# Altium footprint library PcbLib.PcbLib: 162 footprints (part 5 of 11)
Each footprint in its own frame and in the unit in brackets; x right, y up, seen from the top. Pads: shape width x height; smd on the part's side, far side on the other; paste and mask are expansions set on the pad; w line width, h text height; cw(c..) or ccw(c..) is an arc to the next point about the centre after c.
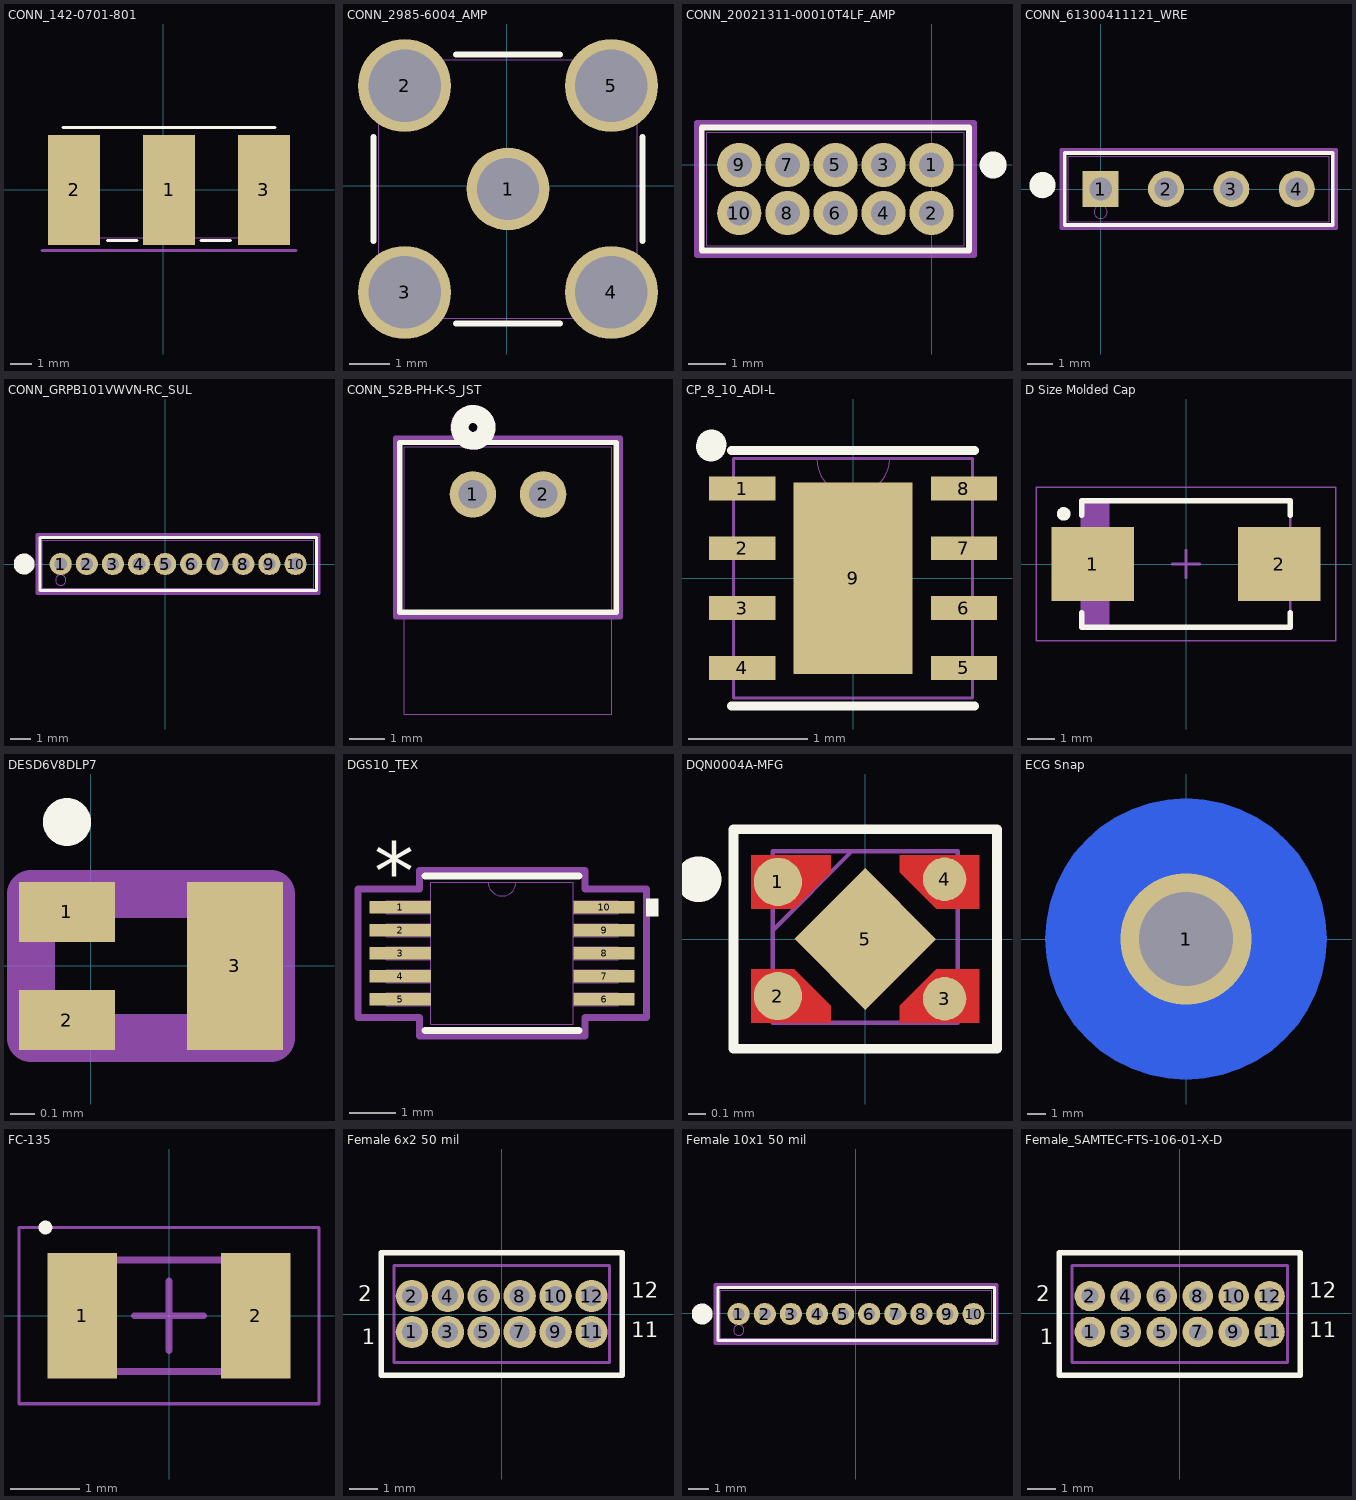
[diagram p4: the footprints below, top view; thin cyan lines are the x and y axes]

## CONN_142-0701-801 [mil]
pads (3):
  rect 95x200 smd: 1(10,0) 2(-162.5,0) 3(182.5,0)
Top Overlay:
  lines w6: -182.5,113.1 202.5,113.1 ; -101.9,-92 -48.1,-92 ; 68.1,-92 121.9,-92
Mechanical 5:
  lines w6: -220,-110 240,-110
Mechanical 13:
  circle w20: c10,-75 r15
  lines w1: -177.5,-87 197.5,-87
3D body "32k145-400l5.stp": height 165.35, standoff -145.67, extent -177,-465.09 197.01,95.94

## CONN_2985-6004_AMP [mil]
pads (5):
  round 80 hole 60 mask+0: 1(1,-3)
  round 90 hole 70 mask+0: 2(-99,97) 3(-99,-103) 4(101,-103) 5(101,97)
Top Overlay:
  lines w6: -129,-53.24 -129,47.24 ; -49.24,-133 51.24,-133 ; -49.24,127 51.24,127 ; 131,-53.24 131,47.24
Mechanical 13:
  lines w1: -124,-128 -124,122 126,122 126,-128 -124,-128

## CONN_20021311-00010T4LF_AMP [mil]
pads (10):
  round 46 hole 26 mask+0: 1(0,0) 2(0,-50) 3(-50,0) 4(-50,-50) 5(-100,0) 6(-100,-50) 7(-150,0) 8(-150,-50) 9(-200,0) 10(-200,-50)
Top Overlay:
  circle w20: c64,0 r4
  lines w6: -239,-89 39,-89 39,39 -239,39 -239,-89
Bottom Overlay:
  circle w20: c63,0 r3.16
Mechanical 13:
  lines w1: -234,-84 34,-84 34,34 -234,34 -234,-84
Mechanical 15:
  lines w6: -244,-94 -244,44 44,44 44,-94 -244,-94
3D body "20021311-0010XXLFc.stp": height 169.8, standoff -93.98, extent -235,-84.06 33.11,34.06
3D body: height 10, standoff 0, extent 0,0 10,10

## CONN_61300411121_WRE [mil]
pads (4):
  rect 55x55 hole 35 mask+0: 1(0,0)
  round 55 hole 35 mask+0: 2(100,0) 3(200,0) 4(300,0)
Top Overlay:
  circle w20: c-89,6 r10
  lines w6: -55,-55 355,-55 355,55 -55,55 -55,-55
Mechanical 7:
  lines w1: -89,-14 -79,-9
Mechanical 13:
  circle w0: c0,-35 r10
  lines w1: -50,-50 350,-50 350,50 -50,50 -50,-50
Mechanical 15:
  lines w6: -60,-60 -60,60 360,60 360,-60 -60,-60
3D body: height 10, standoff 0, extent 0,0 10,10

## CONN_GRPB101VWVN-RC_SUL [mm]
pads (10):
  round 1.08 hole 0.61 mask+0: 1(-5.08,0) 2(-3.81,0) 3(-2.54,0) 4(-1.27,0) 5(0,0) 6(1.27,0) 7(2.54,0) 8(3.81,0) 9(5.08,0) 10(6.35,0)
Top Overlay:
  circle w0.508: c-6.858,0 r0.254
  lines w0.152: -6.096,-1.295 7.366,-1.295 7.366,1.295 -6.096,1.295 -6.096,-1.295
Mechanical 13:
  circle w0: c-5.08,-0.787 r0.254
  lines w0.025: -5.969,-1.168 7.239,-1.168 7.239,1.168 -5.969,1.168 -5.969,-1.168
Mechanical 15:
  lines w0.152: -6.223,-1.422 -6.223,1.422 7.493,1.422 7.493,-1.422 -6.223,-1.422
3D body: height 0.25, standoff 0, extent -5.08,0 -4.826,0.254
3D body "_ _ _B101VWVN-RC.STEP": height 4.01, standoff -2.29, extent -5.715,-1.067 6.985,1.073

## CONN_S2B-PH-K-S_JST [mil]
pads (2):
  round 52 hole 32 mask+0: 1(1275,-4125) 2(1353.74,-4125)
Top Overlay:
  circle w20: c1275.37,-4050 r15
  lines w6: 1193.37,-4067 1193.37,-4256.85 1253.87,-4256.85 1374.87,-4256.85 1435.37,-4256.85 1435.37,-4067 ; 1193.37,-4066.85 1435.37,-4066.85
Bottom Overlay:
  circle w20: c1275.37,-4050 r15
Mechanical 13:
  circle w20: c1275,-4050 r15
  lines w1: 1198.37,-4370.85 1430.37,-4370.85 1430.37,-4071.85 1198.37,-4071.85 1198.37,-4370.85
Mechanical 15:
  lines w6: 1188.37,-4261.85 1188.37,-4061.85 1439.85,-4061.85 1440.37,-4062.37 1440.37,-4261.85 1188.37,-4261.85
3D body "S2B-PH-K-S(LF)(SN)--3DModel-STEP-1.STEP": height 189.48, standoff -132.68, extent 1198.82,-4372.05 1431.1,-4072.83
3D body: height 10, standoff 0, extent 1275,-4125 1285,-4115

## CP_8_10_ADI-L [mm]
pads (9):
  rect 0.553x0.199 smd paste+0 mask+0.051: 1(-0.927,0.75) 2(-0.927,0.25) 3(-0.927,-0.25) 4(-0.927,-0.75) 5(0.927,-0.75) 6(0.927,-0.25) 7(0.927,0.25) 8(0.927,0.75)
  rect 0.994x1.6 smd paste+0 mask+0.051: 9(0,0)
Top Overlay:
  lines w0.076: -1.016,-1.067 1.016,-1.067 ; -1.016,1.067 1.016,1.067
  lines w0.25: -1.187,1.1 ccw(c-1.245,1.118) -1.185,1.118
Mechanical 13:
  lines w0: -0.305,1 ccw(c0,1) 0.305,1
  lines w0.025: -1,-1 -1,1 1,1 1,-1 -1,-1
3D body "CP_8_10_ADI.step": height 0.55, standoff 0, extent -1,-1 1,1

## D Size Molded Cap [mm] "Molded Capacitor, 2-Leads, Size D, IPC Low Density"
height 3.1
pads (2):
  rect 3x2.7 smd: 1(-3.4,0) 2(3.4,0)
Top Overlay:
  circle w0.25: c-4.45,1.825 r0.125
  lines w0.2: -3.8,-1.778 -3.8,-2.3 3.8,-2.3 3.8,-1.778 ; -3.8,1.778 -3.8,2.3 3.8,2.3 3.8,1.778
Mechanical 13:
  rectangle: -3.8,-2.3 -2.778,2.3
  lines w0.1: -3.8,-2.3 -3.8,2.3 3.8,2.3 3.8,-2.3 -3.8,-2.3
Mechanical 15:
  lines w0.05: -5.461,-2.8 -5.461,2.8 5.461,2.8 5.461,-2.8 -5.461,-2.8
  lines w0.1: -0.5,0 0.5,0 ; 0,-0.5 0,0.5
3D body "User Library-CaseD_7343-31.STEP": height 2.8, standoff 0, extent -3.65,-2.15 3.65,2.15

## DESD6V8DLP7 [mm]
pads (3):
  rect 0.4x0.25 smd mask+0.074: 1(-0.1,0.225) 2(-0.1,-0.225)
  rect 0.4x0.7 smd: 3(0.6,0)
Top Overlay:
  lines w0.1: -0.15,0.6 cw(c-0.1,0.6) -0.05,0.6 cw(c-0.1,0.6) -0.15,0.6
Mechanical 13:
  lines w0.2: -0.25,-0.3 -0.25,0.3 0.75,0.3 0.75,-0.3 -0.25,-0.3
3D body "DMP32D5SFB-7B.stp": height 0.53, standoff 0, extent -0.25,-0.3 0.75,0.3

## DGS10_TEX [mil]
pads (10):
  rect 52.5x11 smd paste+0 mask+0: 1(-707.25,-1855.63) 2(-707.25,-1875.32) 3(-707.25,-1895) 4(-707.25,-1914.68) 5(-707.25,-1934.37) 6(-532.75,-1934.37) 7(-532.75,-1914.68) 8(-532.75,-1895) 9(-532.75,-1875.32) 10(-532.75,-1855.63)
Top Overlay:
  region: -496.5,-1848.13 -486.5,-1848.13 -486.5,-1863.13 -496.5,-1863.13
  lines w6: -686,-1961 -554,-1961 ; -686,-1829 -554,-1829
  text "*" at -729.75,-1849.63 h50
Mechanical 13:
  lines w0: -632,-1834 ccw(c-620,-1834) -608,-1834
  lines w1: -719.5,-1939.87 -681,-1939.87 -681,-1928.87 -719.5,-1928.87 -719.5,-1939.87 ; -719.5,-1920.18 -681,-1920.18 -681,-1909.18 -719.5,-1909.18 -719.5,-1920.18 ; -719.5,-1900.5 -681,-1900.5 -681,-1889.5 -719.5,-1889.5 -719.5,-1900.5 ; -719.5,-1880.82 -681,-1880.82 -681,-1869.82 -719.5,-1869.82 -719.5,-1880.82 ; -719.5,-1861.13 -681,-1861.13 -681,-1850.13 -719.5,-1850.13 -719.5,-1861.13 ; -681,-1956 -681,-1834 -559,-1834 -559,-1956 -681,-1956 ; -559,-1939.87 -520.5,-1939.87 -520.5,-1928.87 -559,-1928.87 -559,-1939.87 ; -559,-1920.18 -520.5,-1920.18 -520.5,-1909.18 -559,-1909.18 -559,-1920.18 ; -559,-1900.5 -520.5,-1900.5 -520.5,-1889.5 -559,-1889.5 -559,-1900.5 ; -559,-1880.82 -520.5,-1880.82 -520.5,-1869.82 -559,-1869.82 -559,-1880.82 ; -559,-1861.13 -520.5,-1861.13 -520.5,-1850.13 -559,-1850.13 -559,-1861.13
  text "*" at -678.5,-1887 h50
Mechanical 15:
  lines w6: -743.5,-1949.87 -691,-1949.87 -691,-1966 -549,-1966 -549,-1949.87 -496.5,-1949.87 -496.5,-1840.13 -549,-1840.13 -549,-1824 -691,-1824 -691,-1840.13 -743.5,-1840.13 -743.5,-1949.87
3D body "DGS10_TEX.step": height 43.11, standoff 0, extent -719.48,-1955.98 -520.5,-1834.01
3D body: height 10, standoff 0, extent -620,-1895 -610,-1885

## DQN0004A-MFG [mm]
pads (5):
  round 0.279 smd paste-0.127 mask-0.127: 1(-0.505,0.33) 2(-0.505,-0.33)
  round 0.251 smd paste-0.113 mask-0.114: 3(0.459,-0.346) 4(0.459,0.346)
  rect 0.58x0.58 smd rot 135 paste-0.277 mask-0.279: 5(0,0)
Top Layer:
  region: -0.66,0.175 -0.66,0.485 -0.2,0.485 -0.2,0.385 -0.41,0.175
  region: 0.66,-0.175 0.66,-0.485 0.2,-0.485 0.2,-0.385 0.41,-0.175
  region: 0.66,0.175 0.66,0.485 0.2,0.485 0.2,0.385 0.41,0.175
  region: -0.66,-0.175 -0.66,-0.485 -0.2,-0.485 -0.2,-0.385 -0.41,-0.175
Top Overlay:
  circle w0.25: c-0.965,0.346 r0.008
  lines w0.056: -0.762,-0.635 0.762,-0.635 0.762,0.635 -0.762,0.635 -0.762,-0.635
Top Paste:
  region: 0.283,0.035 0.283,-0.035 0.035,-0.283 -0.035,-0.283 -0.283,-0.035 -0.283,0.035 -0.035,0.283 0.035,0.283
  region: -0.65,0.225 -0.65,0.435 -0.25,0.435 -0.25,0.405 -0.43,0.225
  region: 0.65,0.225 0.65,0.435 0.25,0.435 0.25,0.405 0.43,0.225
  region: -0.65,-0.225 -0.65,-0.435 -0.25,-0.435 -0.25,-0.405 -0.43,-0.225
  region: 0.65,-0.225 0.65,-0.435 0.25,-0.435 0.25,-0.405 0.43,-0.225
Top Solder:
  region: -0.304,-0.035 -0.304,0.035 -0.035,0.304 0.035,0.304 0.304,0.035 0.304,-0.035 0.035,-0.304 -0.035,-0.304
  region: -0.61,0.225 -0.61,0.435 -0.25,0.435 -0.25,0.405 -0.43,0.225
  region: 0.61,0.225 0.61,0.435 0.25,0.435 0.25,0.405 0.43,0.225
  region: 0.61,-0.225 0.61,-0.435 0.25,-0.435 0.25,-0.405 0.43,-0.225
  region: -0.61,-0.225 -0.61,-0.435 -0.25,-0.435 -0.25,-0.405 -0.43,-0.225
Mechanical 13:
  lines w0.025: -0.533,0.051 -0.077,0.509 ; -0.535,-0.485 -0.535,0.508 0.535,0.508 0.535,-0.485 -0.535,-0.485
3D body "DQN0004A.stp": height 0.37, standoff 0.01, extent -0.5,-0.5 0.5,0.5

## ECG Snap [mm] "ECG Lead Snap Grabber"
pads (2):
  round 7 smd: 1(0,0)
  round 15 smd far side: 1(0,0)
via 0,0 diameter 7 hole 5
Top Overlay:
  circle w0.2: c0,0 r4
Bottom Overlay:
  circle w0.2: c0,0 r8
Mechanical 15:
  circle w0.254: c0,0 r5.01

## FC-135 [mm] "DFN, 2-Leads, Body 3.20x1.50mm, IPC Low Density"
height 0.9
pads (2):
  rect 1x1.8 smd: 1(-1.25,0) 2(1.25,0)
Top Overlay:
  circle w0.1: c-1.778,1.27 r0.05
Mechanical 13:
  lines w0.1: -1.65,-0.8 1.65,-0.8 1.65,0.8 -1.65,0.8 -1.65,-0.8
Mechanical 15:
  lines w0.05: -2.159,-1.27 2.159,-1.27 2.159,1.27 -2.159,1.27 -2.159,-1.27
  lines w0.1: -0.5,0 0.5,0 ; 0,-0.5 0,0.5
3D body "User Library-TF20D.STEP": height 0.6, standoff 0, extent -1,-0.6 1,0.6

## Female 6x2 50 mil [mil]
pads (12):
  round 45 hole 27.95: 1(-125,-25) 2(-125,25) 3(-75,-25) 4(-75,25) 5(-25,-25) 6(-25,25) 7(25,-25) 8(25,25) 9(75,-25) 10(75,25) 11(125,-25) 12(125,25)
Top Overlay:
  lines w7.87: -167.72,-85.24 167.72,-85.24 167.72,85.24 -167.72,85.24 -167.72,-85.24
  text "12" at 180,15 h37.5
  text "11" at 180,-40 h37.5
  text "2" at -200,10 h37.5
  text "1" at -195,-50 h37.5
Top Solder:
  circle w0: c125,25 r24.49
  circle w0: c125,-25 r24.49
  circle w0: c75,25 r24.49
  circle w0: c75,-25 r24.49
  circle w0: c25,25 r24.49
  circle w0: c25,-25 r24.49
  circle w0: c-25,25 r24.49
  circle w0: c-25,-25 r24.49
  circle w0: c-75,25 r24.49
  circle w0: c-75,-25 r24.49
  circle w0: c-125,25 r24.49
  circle w0: c-125,-25 r24.49
Bottom Solder:
  circle w0: c125,25 r24.49
  circle w0: c125,-25 r24.49
  circle w0: c75,25 r24.49
  circle w0: c75,-25 r24.49
  circle w0: c25,25 r24.49
  circle w0: c25,-25 r24.49
  circle w0: c-25,25 r24.49
  circle w0: c-25,-25 r24.49
  circle w0: c-75,25 r24.49
  circle w0: c-75,-25 r24.49
  circle w0: c-125,25 r24.49
  circle w0: c-125,-25 r24.49
Mechanical 16:
  lines w3.94: -150,-67.48 -100,-67.48 -50,-67.48 0,-67.48 50,-67.48 100,-67.48 150,-67.48 150,67.48 100,67.48 50,67.48 0,67.48 -50,67.48 -100,67.48 -150,67.48 -150,-67.48 ; -132.99,-32.99 -132.99,-17.01 -117.01,-17.01 -117.01,-32.99 -132.99,-32.99 ; -132.99,17.01 -117.01,17.01 -117.01,32.99 -132.99,32.99 -132.99,17.01 ; -82.99,-32.99 -67.01,-32.99 -67.01,-17.01 -82.99,-17.01 -82.99,-32.99 ; -82.99,17.01 -67.01,17.01 -67.01,32.99 -82.99,32.99 -82.99,17.01 ; -32.99,-32.99 -17.01,-32.99 -17.01,-17.01 -32.99,-17.01 -32.99,-32.99 ; -32.99,17.01 -17.01,17.01 -17.01,32.99 -32.99,32.99 -32.99,17.01 ; 17.01,-32.99 32.99,-32.99 32.99,-17.01 17.01,-17.01 17.01,-32.99 ; 17.01,17.01 32.99,17.01 32.99,32.99 17.01,32.99 17.01,17.01 ; 67.01,-32.99 82.99,-32.99 82.99,-17.01 67.01,-17.01 67.01,-32.99 ; 67.01,17.01 82.99,17.01 82.99,32.99 67.01,32.99 67.01,17.01 ; 117.01,-32.99 132.99,-32.99 132.99,-17.01 117.01,-17.01 117.01,-32.99 ; 117.01,17.01 132.99,17.01 132.99,32.99 117.01,32.99 117.01,17.01
3D body "m50-3000645_asm.stp": height 173.73, standoff -93.98, extent -159.85,-63.03 159.84,59.02

## Female 10x1 50 mil [mm]
pads (10):
  round 1.08 hole 0.584 mask+0: 1(-5.69,-0.025) 2(-4.42,-0.025) 3(-3.15,-0.025) 4(-1.88,-0.025) 5(-0.61,-0.025) 6(0.66,-0.025) 7(1.93,-0.025) 8(3.2,-0.025) 9(4.47,-0.025) 10(5.74,-0.025)
Top Overlay:
  circle w0.508: c-7.468,-0.025 r0.254
  lines w0.152: -6.706,-1.321 -6.706,1.27 6.756,1.27 6.756,-1.321 -6.706,-1.321
Mechanical 13:
  circle w0: c-5.69,-0.813 r0.254
  lines w0.025: -6.579,-1.194 -6.579,1.143 6.629,1.143 6.629,-1.194 -6.579,-1.194
Mechanical 15:
  lines w0.152: -6.833,-1.448 6.883,-1.448 6.883,1.397 -6.833,1.397 -6.833,-1.448
3D body: height 0.25, standoff 0, extent -5.69,-0.025 -5.436,0.229
3D body "_ _ _B101NFFN-RC.STEP": height 4.51, standoff -2.99, extent -6.525,-1.108 6.575,1.092

## Female_SAMTEC-FTS-106-01-X-D [mm]
pads (12):
  round 1.08 hole 0.61: 1(-3.175,-0.66) 2(-3.175,0.61) 3(-1.905,-0.66) 4(-1.905,0.61) 5(-0.635,-0.66) 6(-0.635,0.61) 7(0.635,-0.66) 8(0.635,0.61) 9(1.905,-0.66) 10(1.905,0.61) 11(3.175,-0.66) 12(3.175,0.61)
Top Overlay:
  lines w0.2: -4.26,-2.19 -4.26,2.14 4.26,2.14 4.26,-2.19 -4.26,-2.19
  text "1" at -4.953,-1.295 h0.95
  text "2" at -5.08,0.229 h0.95
  text "11" at 4.572,-1.041 h0.95
  text "12" at 4.572,0.356 h0.95
Top Solder:
  circle w0: c-3.175,-0.66 r0.622
  circle w0: c-3.175,0.61 r0.622
  circle w0: c-1.905,-0.66 r0.622
  circle w0: c-1.905,0.61 r0.622
  circle w0: c-0.635,-0.66 r0.622
  circle w0: c-0.635,0.61 r0.622
  circle w0: c0.635,-0.66 r0.622
  circle w0: c0.635,0.61 r0.622
  circle w0: c1.905,-0.66 r0.622
  circle w0: c1.905,0.61 r0.622
  circle w0: c3.175,-0.66 r0.622
  circle w0: c3.175,0.61 r0.622
Bottom Solder:
  circle w0: c-3.175,-0.66 r0.622
  circle w0: c-3.175,0.61 r0.622
  circle w0: c-1.905,-0.66 r0.622
  circle w0: c-1.905,0.61 r0.622
  circle w0: c-0.635,-0.66 r0.622
  circle w0: c-0.635,0.61 r0.622
  circle w0: c0.635,-0.66 r0.622
  circle w0: c0.635,0.61 r0.622
  circle w0: c1.905,-0.66 r0.622
  circle w0: c1.905,0.61 r0.622
  circle w0: c3.175,-0.66 r0.622
  circle w0: c3.175,0.61 r0.622
Mechanical 16:
  lines w0.1: -3.81,-1.739 -3.81,1.689 -2.54,1.689 -1.27,1.689 0,1.689 1.27,1.689 2.54,1.689 3.81,1.689 3.81,-1.739 2.54,-1.739 1.27,-1.739 0,-1.739 -1.27,-1.739 -2.54,-1.739 -3.81,-1.739 ; -3.378,-0.863 -2.972,-0.863 -2.972,-0.457 -3.378,-0.457 -3.378,-0.863 ; -3.378,0.407 -3.378,0.813 -2.972,0.813 -2.972,0.407 -3.378,0.407 ; -2.108,-0.863 -2.108,-0.457 -1.702,-0.457 -1.702,-0.863 -2.108,-0.863 ; -2.108,0.407 -2.108,0.813 -1.702,0.813 -1.702,0.407 -2.108,0.407 ; -0.838,-0.863 -0.838,-0.457 -0.432,-0.457 -0.432,-0.863 -0.838,-0.863 ; -0.838,0.407 -0.838,0.813 -0.432,0.813 -0.432,0.407 -0.838,0.407 ; 0.432,-0.863 0.432,-0.457 0.838,-0.457 0.838,-0.863 0.432,-0.863 ; 0.432,0.407 0.432,0.813 0.838,0.813 0.838,0.407 0.432,0.407 ; 1.702,-0.863 1.702,-0.457 2.108,-0.457 2.108,-0.863 1.702,-0.863 ; 1.702,0.407 1.702,0.813 2.108,0.813 2.108,0.407 1.702,0.407 ; 2.972,-0.863 2.972,-0.457 3.378,-0.457 3.378,-0.863 2.972,-0.863 ; 2.972,0.407 2.972,0.813 3.378,0.813 3.378,0.407 2.972,0.407
3D body "_ _ _B062CFFN-RC.STEP": height 4.51, standoff -2.99, extent -4.035,-1.524 3.985,1.576